# Altium schematic symbol library pin_functions_none.SchLib: 1 symbol
Pins are listed as number, name and electrical type; pins without a type are passive.

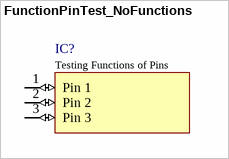
[diagram p0: symbol FunctionPinTest_NoFunctions]

## FunctionPinTest_NoFunctions
designator IC?, comment Testing Functions of Pins
Test Description, not relevant
pins: 1 Pin 1 (io), 2 Pin 2 (io), 3 Pin 3 (io)